# Altium schematic symbol library STPMotorControl_1.SchLib: 82 symbols
Pins are listed as number, name and electrical type; pins without a type are passive.

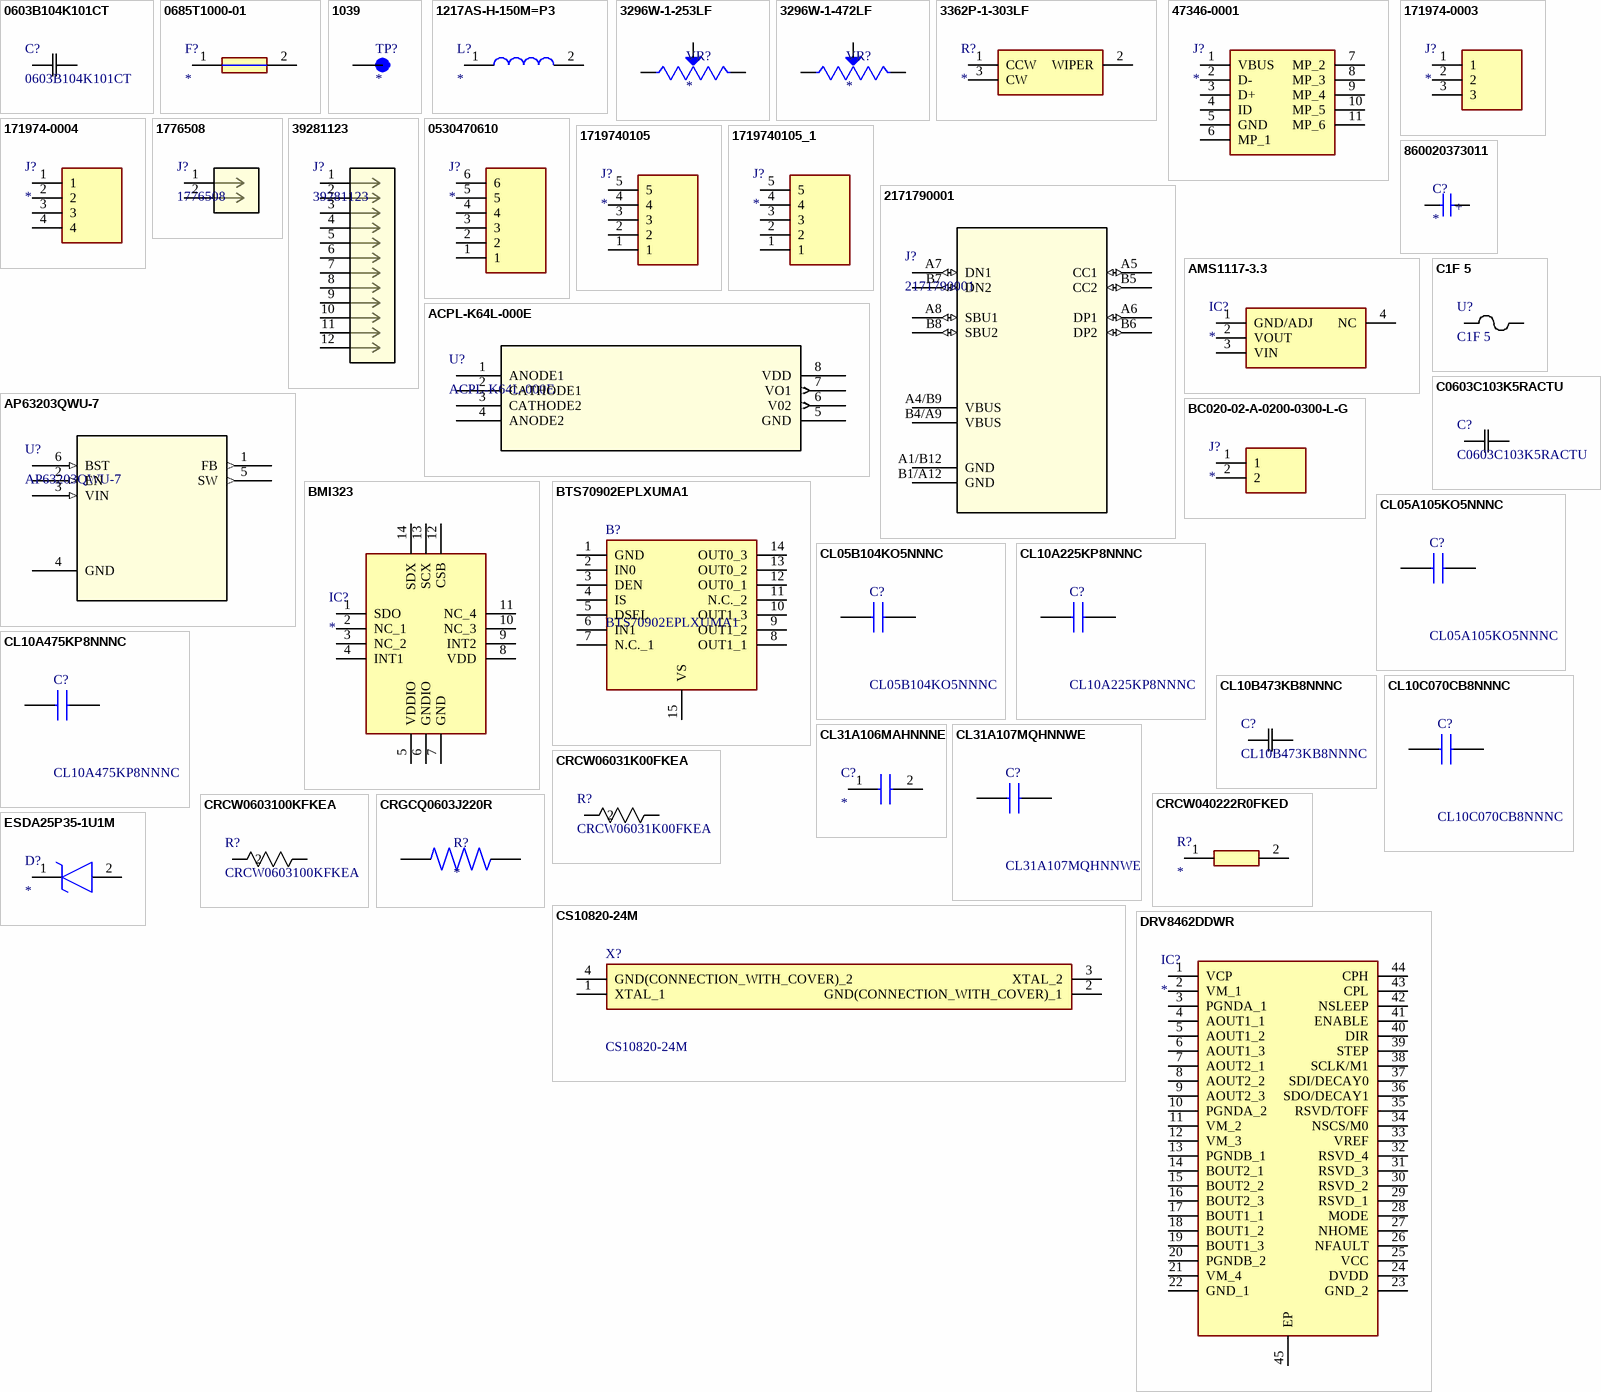
[diagram p0: symbols 0603B104K101CT to ESDA25P35-1U1M]

## 0603B104K101CT
designator C?
Description; Manufacturer_Name: Walsin; Copyright: Copyright (C) 2025 Ultra Librarian. All rights reserved.; Manufacturer_Part_Number: 0603B104K101CT
footprint CAP_0603_WAL
pins: 1, 2

## 0685T1000-01
designator F?
Fuse; Manufacturer_Name: BelFuse; Manufacturer_Part_Number: 0685T1000-01; Datasheet Link: https://www.belfuse.com/resources/datasheets/circuitprotection/ds-cp-c1t-series.pdf; Height: 0.83mm
footprint FUSC3216X83N
pins: 1, 2

## 1039
designator TP?
Slotted Type THM Test Point; MF: Keystone; MP: 1039; SnapEDA_Link: https://www.snapeda.com/parts/1039/Keystone/view-part/?ref=snap; Package: None; Value: *; Check_prices: https://www.snapeda.com/parts/1039/Keystone/view-part/?ref=eda
footprint KEYSTONE_1039
pins: TP

## 1217AS-H-150M=P3
designator L?
Inductor; Manufacturer_Name: Murata Electronics; Manufacturer_Part_Number: 1217AS-H-150M=P3; Datasheet Link: https://search.murata.co.jp/Ceramy/image/img/P02/J(E)TE243B-0035_DEM8045C.pdf; Height: 4.5mm; Mouser Part Number: 81-1217AS-H-150MP3; Mouser Price/Stock: https://www.mouser.co.uk/ProductDetail/Murata-Electronics/1217AS-H-150M%3dP3?qs=KuGPmAKtFKX7NbjmVB%2FVOw%3D%3D; Arrow Part Number: 1217AS-H-150M=P3; Arrow Price/Stock: https://www.arrow.com/en/products/1217as-h-150mp3/murata-manufacturing?region=nac
footprint 1217ASH100MP3
pins: 1, 2

## 3296W-1-253LF
designator VR?
TRIMMER,CERMET,REST 25 KILOHMS,PCB,25 TURNS,PWR-RTG 0.5W | Bourns 3296W-1-253LF; SnapEDA_Link: https://www.snapeda.com/parts/3296W-1-253LF/Bourns/view-part/?ref=snap; Package: NON STANDARD-3 Bourns; Value: *; MF: Bourns; MP: 3296W-1-253LF; Check_prices: https://www.snapeda.com/parts/3296W-1-253LF/Bourns/view-part/?ref=eda
footprint TRIM_3296W-1-253LF
pins: 1 CCW, 2 WIPER, 3 CW

## 3296W-1-472LF
designator VR?
3296W top adj cermet trimmer 4K7 10%,PCB,25 Turns,Pwr-Rtg 0.5W | Bourns 3296W-1-472LF; SnapEDA_Link: https://www.snapeda.com/parts/3296W-1-472LF/Bourns/view-part/?ref=snap; Package: NON STANDARD-3 Bourns; Value: *; MF: Bourns; MP: 3296W-1-472LF; Check_prices: https://www.snapeda.com/parts/3296W-1-472LF/Bourns/view-part/?ref=eda
footprint TRIM_3296W-1-472LF
pins: 1 CCW, 2 WIPER, 3 CW

## 3362P-1-303LF
designator R?
Resistor; Manufacturer_Name: Bourns; Manufacturer_Part_Number: 3362P-1-303LF; Datasheet Link: https://datasheet.datasheetarchive.com/originals/distributors/SFDatasheet-6/sf-000139931.pdf; Mouser Part Number: 652-3362P-1-303LF; Mouser Price/Stock: https://www.mouser.co.uk/ProductDetail/Bourns/3362P-1-303LF?qs=Z6TheJuxhEr3uHsohP3p0g%3D%3D; Arrow Part Number: 3362P-1-303LF; Arrow Price/Stock: https://www.arrow.com/en/products/3362p-1-303lf/bourns
footprint 3362P_1
pins: 1 CCW, 2 WIPER, 3 CW

## 47346-0001
designator J?
Connector; Manufacturer_Name: Molex; Manufacturer_Part_Number: 47346-0001; Datasheet Link: http://www.molex.com/pdm_docs/sd/473460001_sd.pdf; Height: 3.19mm; Mouser Part Number: 538-47346-0001; Mouser Price/Stock: https://www.mouser.co.uk/ProductDetail/Molex/47346-0001?qs=c2CV6XM0DweJBWaSeyWeCw%3D%3D
footprint 473460001
pins: 1 VBUS, 2 D-, 3 D+, 4 ID, 5 GND, 6 MP_1, 7 MP_2, 8 MP_3, 9 MP_4, 10 MP_5, 11 MP_6

## 171974-0003
designator J?
Connector; Manufacturer_Name: Molex; Manufacturer_Part_Number: 171974-0003; Datasheet Link: https://www.molex.com/pdm_docs/sd/1719740004_sd.pdf; Height: 7mm; Mouser Part Number: 538-171974-0003; Mouser Price/Stock: https://www.mouser.co.uk/ProductDetail/Molex/171974-0003?qs=lc2O%252BfHJPVYntbbOXokF%2FA%3D%3D
footprint SHDR3W97P0X254_1X3_1008X1359X700P
pins: 1, 2, 3

## 171974-0004
designator J?
Connector; Manufacturer_Name: Molex; Manufacturer_Part_Number: 171974-0004; Datasheet Link: https://www.molex.com/pdm_docs/sd/1719740004_sd.pdf; Height: 7mm; Mouser Part Number: 538-171974-0004; Mouser Price/Stock: https://www.mouser.co.uk/ProductDetail/Molex/171974-0004?qs=lc2O%252BfHJPVbT43D8v40enA%3D%3D; Arrow Part Number: 171974-0004; Arrow Price/Stock: https://www.arrow.com/en/products/1719740004/molex?region=nac
footprint SHDR4W97P0X254_1X4_1262X1359X700P
pins: 1, 2, 3, 4

## 1776508
designator J?
PCB headers, nominal current: 12 A, rated voltage (III/2): 320 V, number of positions: 2, pitch: 5.08 mm, color: green, contact surface: Tin, mounting: Wave soldering, Gold-plated contact surface / color: Green RAL 6021; Manufacturer_Name: Phoenix Contact; Copyright: Copyright (C) 2026 Ultra Librarian. All rights reserved.; Manufacturer_Part_Number: 1776508; RefDes: RefDes; Type: Type
footprint CONN_1776508
pins: 1, 2

## 39281123
designator J?
Mini-Fit Jr. Vertical Header, 4.20mm Pitch, Dual Row, 12 Circuits, without Snap-in Plastic Peg PCB Lock, Tin, Natural; Manufacturer_Name: Molex Connector Corporation; Copyright: Copyright (C) 2025 Ultra Librarian. All rights reserved.; Manufacturer_Part_Number: 39281123; RefDes: RefDes; Type: Type
footprint CONN_SD-5566-002_12_MOL
pins: 1, 2, 3, 4, 5, 6, 7, 8, 9, 10, 11, 12

## 0530470610
designator J?
Connector; Manufacturer_Name: Molex; Manufacturer_Part_Number: 0530470610; Datasheet Link: https://www.molex.com/en-us/products/part-detail-pdf/530470610?display=pdf; Height: 4.2mm; Mouser Part Number: N/A; Mouser Price/Stock: https://www.mouser.co.uk/ProductDetail/Molex/0530470610?qs=PBcRNPEHKsoVfWX4tW1QoQ%3D%3D; Arrow Part Number: 0530470610; Arrow Price/Stock: https://www.arrow.com/en/products/0530470610/molex.html?utm_currency=USD&region=europe
footprint 530470610
pins: 1, 2, 3, 4, 5, 6

## 1719740105
designator J?
Connector; Manufacturer_Name: Molex; Manufacturer_Part_Number: 1719740105; Datasheet Link: https://www.molex.com/en-us/products/part-detail-pdf/1719740105?display=pdf; Height: 7mm
footprint 171974YY05
pins: 1, 2, 3, 4, 5

## 1719740105_1
designator J?
Connector; Manufacturer_Name: Molex; Manufacturer_Part_Number: 1719740105; Datasheet Link: https://www.molex.com/en-us/products/part-detail-pdf/1719740105?display=pdf; Height: 7mm
footprint 171974YY05
pins: 1, 2, 3, 4, 5

## 2171790001
designator J?
Universal Serial Bus (USB) Shielded I/O Receptacle, Type C, Right-Angle, Top Mount, Surface Mount, Single Row, 16 Circuits, Gold (Au) Plating; Manufacturer_Name: Molex Connector Corporation; Copyright: Copyright (C) 2025 Ultra Librarian. All rights reserved.; Manufacturer_Part_Number: 2171790001; RefDes: RefDes; Type: Type
footprint 2171790001_MOL
pins: A1/B12 GND (power), A4/B9 VBUS (power), A5 CC1 (io), A6 DP1 (io), A7 DN1 (io), A8 SBU1 (io), B1/A12 GND (power), B4/A9 VBUS (power), B5 CC2 (io), B6 DP2 (io), B7 DN2 (io), B8 SBU2 (io)

## 860020373011
designator C?
330 ÂµF 16 V Aluminum Electrolytic Capacitors Radial, Can 2000 Hrs @ 105Â°C; MF: WÃ¼rth Elektronik; MP: 860020373011; SnapEDA_Link: https://www.snapeda.com/parts/860020373011/W%25C3%25BCrth+Elektronik+Midcom/view-part/?ref=snap; Package: Radial WÃ¼rth Elektronik; Value: *; Check_prices: https://www.snapeda.com/parts/860020373011/W%25C3%25BCrth+Elektronik+Midcom/view-part/?ref=eda
footprint 860020373011
pins: 1 POS, 2 NEG
text: +

## ACPL-K64L-000E
designator U?
Description; Manufacturer_Name: Avago Technologies; Copyright: Copyright (C) 2026 Ultra Librarian. All rights reserved.; Manufacturer_Part_Number: ACPL-K64L-000E; RefDes: RefDes; Type: Type
footprint STRETCHED_SO-8_AVA
pins: 1 ANODE1, 2 CATHODE1, 3 CATHODE2, 4 ANODE2, 5 GND (power), 6 V02 (out), 7 VO1 (out), 8 VDD (power)

## AMS1117-3.3
designator IC?
Integrated Circuit; Manufacturer_Name: Advanced; Manufacturer_Part_Number: AMS1117-3.3; Datasheet Link: https://datasheet.datasheetarchive.com/originals/distributors/Datasheets-28/DSA-550594.pdf; Height: 1.8mm
footprint SOT229P700X180-4N
pins: 1 GND/ADJ, 2 VOUT, 3 VIN, 4 NC

## AP63203QWU-7
designator U?
Description; Manufacturer_Name: Diodes Inc; Type: Power Management; Copyright: Copyright (C) 2026 Ultra Librarian. All rights reserved.; Manufacturer_Part_Number: AP63203QWU-7; RefDes: RefDes
footprint TSOT26_DIO
pins: 1 FB (out), 2 EN (in), 3 VIN (in), 4 GND (power), 5 SW (out), 6 BST (in)

## BC020-02-A-0200-0300-L-G
designator J?
Connector; Manufacturer_Name: GCT (GLOBAL CONNECTOR TECHNOLOGY); Manufacturer_Part_Number: BC020-02-A-0200-0300-L-G; Datasheet Link: https://gct.co/connector/bc020; Mouser Part Number: 640-BC02002A02300LG; Mouser Price/Stock: https://www.mouser.co.uk/ProductDetail/GCT/BC020-02-A-0200-0300-L-G?qs=KUoIvG%2F9IlakgsojlT9P9w%3D%3D
footprint BC02002A02000300LG
pins: 1, 2

## BMI323
designator IC?
Integrated Circuit; Manufacturer_Name: BOSCH; Manufacturer_Part_Number: BMI323; Datasheet Link: https://www.bosch-sensortec.com/media/boschsensortec/downloads/datasheets/bst-bmi323-ds000.pdf; Height: 0.87mm; Mouser Part Number: 262-BMI323; Mouser Price/Stock: https://www.mouser.co.uk/ProductDetail/Bosch-Sensortec/BMI323?qs=By6Nw2ByBD3%2FE1v0UqNQPQ%3D%3D; Arrow Part Number: BMI323; Arrow Price/Stock: https://www.arrow.com/en/products/bmi323/bosch-sensortec?utm_currency=USD&region=nac
footprint BMI323
pins: 1 SDO, 2 NC_1, 3 NC_2, 4 INT1, 5 VDDIO, 6 GNDIO, 7 GND, 8 VDD, 9 INT2, 10 NC_3, 11 NC_4, 12 CSB, 13 SCX, 14 SDX

## BTS70902EPLXUMA1
designator B?
Power Load Distribution Switch, High Side, Active High, AEC-Q100, 2 Outputs, 5.7 A, 0.09 ohm PG-TSDSO-14; Manufacturer_Name: Infineon; Geometry.Height: 1.15mm; Manufacturer_Part_Number: BTS70902EPLXUMA1; Mouser Part Number: 726-BTS70902EPLXUMA1; Mouser Price/Stock: https://www.mouser.co.uk/ProductDetail/Infineon-Technologies/BTS70902EPLXUMA1?qs=Jm2GQyTW%2Fbhq4sIv7OLI2g%3D%3D; Arrow Part Number: *; Arrow Price/Stock: *; Datasheet Link: https://www.infineon.com/dgdl/Infineon-BTS7090-2EPL-DataSheet-v01_00-EN.pdf?fileId=8ac78c8c850f4bee0185a14f60fd5abb
footprint SOP65P600X115-15N
pins: 1 GND, 2 IN0, 3 DEN, 4 IS, 5 DSEL, 6 IN1, 7 N.C._1, 8 OUT1_1, 9 OUT1_2, 10 OUT1_3, 11 N.C._2, 12 OUT0_1, 13 OUT0_2, 14 OUT0_3, 15 VS

## C1F 5
designator U?
Description; Manufacturer_Name: Belfuse; Copyright: Copyright (C) 2025 Ultra Librarian. All rights reserved.; Manufacturer_Part_Number: C1F 5
footprint C1_BEL
pins: 1, 2

## C0603C103K5RACTU
designator C?
SMD Comm X7R, Ceramic, 0.01 uF, 10%, 50 VDC, X7R, SMD, MLCC, Temperature Stable, Class II, 0603; Manufacturer_Name: Kemet; Copyright: Copyright (C) 2026 Ultra Librarian. All rights reserved.; Manufacturer_Part_Number: C0603C103K5RACTU
footprint CAPC17595_87N_KEM
pins: 1, 2

## CL05A105KO5NNNC
designator C?
Samsung Electro-Mechanics 0402 (1005M) 1uF Multilayer Ceramic Capacitor MLCC 16V dc +/-10% SMD CL05A105KO5NNNC; Geometry.Height: 0.55mm; Manufacturer_Name: SAMSUNG; Manufacturer_Part_Number: CL05A105KO5NNNC; Mouser Part Number: 187-CL05A105KO5NNNC; Mouser Price/Stock: https://www.mouser.co.uk/ProductDetail/Samsung-Electro-Mechanics/CL05A105KO5NNNC?qs=349EhDEZ59pCm%252BzVtNxq%2FQ%3D%3D; Arrow Part Number: CL05A105KO5NNNC; Arrow Price/Stock: https://www.arrow.com/en/products/cl05a105ko5nnnc/samsung-electro-mechanics?utm_currency=USD&region=nac; Datasheet Link: https://datasheet.lcsc.com/szlcsc/Samsung-Electro-Mechanics-CL05A105KO5NNNC_C29266.pdf
footprint CAPC1005X55N
pins: 1, 2

## CL05B104KO5NNNC
designator C?
Samsung Electro-Mechanics CL05B104KO5NNNC 100nF Multilayer Ceramic Capacitor MLCC 16V dc +/-10% Tolerance SMD; Geometry.Height: 0.55mm; Manufacturer_Name: SAMSUNG; Manufacturer_Part_Number: CL05B104KO5NNNC; Mouser Part Number: 187-CL05B104KO5NNNC; Mouser Price/Stock: https://www.mouser.co.uk/ProductDetail/Samsung-Electro-Mechanics/CL05B104KO5NNNC?qs=hqM3L16%252BxlfT2SKOuAUq6Q%3D%3D; Arrow Part Number: CL05B104KO5NNNC; Arrow Price/Stock: https://www.arrow.com/en/products/cl05b104ko5nnnc/samsung-electro-mechanics.html?utm_currency=USD&region=europe; Datasheet Link: https://datasheet.datasheetarchive.com/originals/distributors/Datasheets-DGA10/2408147.pdf
footprint CAPC1005X55N
pins: 1, 2

## CL10A225KP8NNNC
designator C?
Samsung Electro-Mechanics 0603 CL 2.2uF Ceramic Multilayer Capacitor, 10 V, +85C, X5R Dielectric, +/-10% SMD; Geometry.Height: 0.9mm; Manufacturer_Name: SAMSUNG; Manufacturer_Part_Number: CL10A225KP8NNNC; Mouser Part Number: 187-CL10A225KP8NNNC; Mouser Price/Stock: https://www.mouser.co.uk/ProductDetail/Samsung-Electro-Mechanics/CL10A225KP8NNNC?qs=hqM3L16%252Bxldb5UYUGQVB5Q%3D%3D; Arrow Part Number: CL10A225KP8NNNC; Arrow Price/Stock: https://www.arrow.com/en/products/cl10a225kp8nnnc/samsung-electro-mechanics?region=europe; Datasheet Link: https://datasheet.datasheetarchive.com/originals/distributors/Datasheets-DGA10/2411103.pdf
footprint CAPC1608X90N
pins: 1, 2

## CL10A475KP8NNNC
designator C?
Multilayer Ceramic Capacitors MLCC - SMD/SMT; Manufacturer_Name: SAMSUNG; Geometry.Height: 0.9mm; Manufacturer_Part_Number: CL10A475KP8NNNC; Mouser Part Number: 187-CL10A475KP8NNNC; Mouser Price/Stock: https://www.mouser.co.uk/ProductDetail/Samsung-Electro-Mechanics/CL10A475KP8NNNC?qs=hqM3L16%252BxlfQRmkWsZz5vA%3D%3D; Arrow Part Number: CL10A475KP8NNNC; Arrow Price/Stock: https://www.arrow.com/en/products/cl10a475kp8nnnc/samsung-electro-mechanics?utm_currency=USD&region=nac; Datasheet Link: https://www.arrow.com/en/products/cl10a475kp8nnnc/samsung-electro-mechanics
footprint CAPC1608X90N
pins: 1, 2

## CL10B473KB8NNNC
designator C?
Description; Manufacturer_Name: Samsung; Copyright: Copyright (C) 2026 Ultra Librarian. All rights reserved.; Manufacturer_Part_Number: CL10B473KB8NNNC
footprint CAP_CL10_SAM
pins: 1, 2

## CL10C070CB8NNNC
designator C?
CAP CER 7PF 50V C0G/NP0 0603; Manufacturer_Name: SAMSUNG; Geometry.Height: 0.9mm; Manufacturer_Part_Number: CL10C070CB8NNNC; Mouser Part Number: 187-CL10C070CB8NNNC; Mouser Price/Stock: https://www.mouser.co.uk/ProductDetail/Samsung-Electro-Mechanics/CL10C070CB8NNNC?qs=XHchNesRtUZnqlJter2P1w%3D%3D; Arrow Part Number: CL10C070CB8NNNC; Arrow Price/Stock: https://www.arrow.com/en/products/cl10c070cb8nnnc/samsung-electro-mechanics?utm_currency=USD&region=europe; Datasheet Link: https://4donline.ihs.com/images/VipMasterIC/IC/SEMS/SEMS-S-A0001326985/SEMS-S-A0001326828-1.pdf?hkey=52A5661711E402568146F3353EA87419
footprint CAPC1608X90N
pins: 1, 2

## CL31A106MAHNNNE
designator C?
Capacitor; Manufacturer_Name: SAMSUNG; Manufacturer_Part_Number: CL31A106MAHNNNE; Datasheet Link: https://www.arrow.com/en/products/cl31a106mahnnne/samsung-electro-mechanics; Height: 1.8mm; Mouser Part Number: 187-CL31A106MAHNNNE; Mouser Price/Stock: https://www.mouser.co.uk/ProductDetail/Samsung-Electro-Mechanics/CL31A106MAHNNNE?qs=9y2YoPkPyvYkOWbcUKSn%252BQ%3D%3D; Arrow Part Number: CL31A106MAHNNNE; Arrow Price/Stock: https://www.arrow.com/en/products/cl31a106mahnnne/samsung-electro-mechanics?region=nac
footprint CAPC3216X180N
pins: 1, 2

## CL31A107MQHNNWE
designator C?
Manufacturer_Name: SAMSUNG; Geometry.Height: 1.8mm; Manufacturer_Part_Number: CL31A107MQHNNWE; Mouser Part Number: 187-CL31A107MQHNNWE; Mouser Price/Stock: https://www.mouser.co.uk/ProductDetail/Samsung-Electro-Mechanics/CL31A107MQHNNWE?qs=xZ%2FP%252Ba9zWqZ1plV7MDkjgw%3D%3D; Arrow Part Number: CL31A107MQHNNWE; Arrow Price/Stock: https://www.arrow.com/en/products/cl31a107mqhnnwe/samsung-electro-mechanics?utm_currency=USD&region=nac; Datasheet Link: https://www.arrow.com/en/products/cl31a107mqhnnwe/samsung-electro-mechanics
footprint CAPC3216X180N
pins: 1, 2

## CRCW06031K00FKEA
designator R?
D11/CRCW0603 100 1K 1% ET1 e3; Manufacturer_Name: Vishay; Copyright: Copyright (C) 2026 Ultra Librarian. All rights reserved.; Manufacturer_Part_Number: CRCW06031K00FKEA
footprint RES_CRCW_0603
pins: 1, 2

## CRCW040222R0FKED
designator R?
Resistor; Manufacturer_Name: Vishay; Manufacturer_Part_Number: CRCW040222R0FKED; Datasheet Link: http://www.vishay.com/docs/20035/dcrcwe3.pdf; Height: 0.4mm; Mouser Part Number: 71-CRCW0402-22-E3; Mouser Price/Stock: https://www.mouser.co.uk/ProductDetail/Vishay-Dale/CRCW040222R0FKED?qs=oYI6rOI5zktmsFG%2Fpzi5yg%3D%3D; Arrow Part Number: CRCW040222R0FKED; Arrow Price/Stock: https://www.arrow.com/en/products/crcw040222r0fked/vishay?utm_currency=USD&region=europe
footprint CRCW0402200KFKED
pins: 1, 2

## CRCW0603100KFKEA
designator R?
D11/CRCW0603 100 100K 1% ET1 e3; Manufacturer_Name: Vishay; Copyright: Copyright (C) 2026 Ultra Librarian. All rights reserved.; Manufacturer_Part_Number: CRCW0603100KFKEA
footprint RES_CRCW_0603_VIS
pins: 1, 2

## CRGCQ0603J220R
designator R?
Fixed Resistor CRGCQ 0603 220R 5%; MF: TE Connectivity; MP: CRGCQ0603J220R; SnapEDA_Link: https://www.snapeda.com/parts/CRGCQ0603J220R/TE+Connectivity/view-part/?ref=snap; Package: 0603-2 TE Connectivity; Value: *; Check_prices: https://www.snapeda.com/parts/CRGCQ0603J220R/TE+Connectivity/view-part/?ref=eda
footprint RESC1608X55N
pins: 1, 2

## CS10820-24M
designator X?
24 MHz +/-15ppm Crystal 6pF 80 Ohms 4-SMD, No Lead , -40C ~ 125C; Manufacturer_Name: NDK; Geometry.Height: 0.5mm; Manufacturer_Part_Number: CS10820-24M; Mouser Part Number: *; Mouser Price/Stock: *; Arrow Part Number: *; Arrow Price/Stock: *; Datasheet Link: https://mm.digikey.com/Volume0/opasdata/d220001/medias/docus/7847/EXS00A-CS10820.pdf
footprint CS1082024M
pins: 1 XTAL_1, 2 GND(CONNECTION_WITH_COVER)_1, 3 XTAL_2, 4 GND(CONNECTION_WITH_COVER)_2

## DRV8462DDWR
designator IC?
Integrated Circuit; Manufacturer_Name: Texas Instruments; Manufacturer_Part_Number: DRV8462DDWR; Datasheet Link: https://www.ti.com/lit/gpn/drv8462; Height: 1.2mm; Mouser Part Number: 595-DRV8462DDWR; Mouser Price/Stock: https://www.mouser.co.uk/ProductDetail/Texas-Instruments/DRV8462DDWR?qs=rQFj71Wb1eVexvYNsDfnvA%3D%3D; Arrow Part Number: DRV8462DDWR; Arrow Price/Stock: https://www.arrow.com/en/products/drv8462ddwr/texas-instruments?utm_currency=USD&region=nac
footprint SOP64P810X120-45N
pins: 1 VCP, 2 VM_1, 3 PGNDA_1, 4 AOUT1_1, 5 AOUT1_2, 6 AOUT1_3, 7 AOUT2_1, 8 AOUT2_2, 9 AOUT2_3, 10 PGNDA_2, 11 VM_2, 12 VM_3, 13 PGNDB_1, 14 BOUT2_1, 15 BOUT2_2, 16 BOUT2_3, 17 BOUT1_1, 18 BOUT1_2, 19 BOUT1_3, 20 PGNDB_2, 21 VM_4, 22 GND_1, 23 GND_2, 24 DVDD, 25 VCC, 26 NFAULT, 27 NHOME, 28 MODE, 29 RSVD_1, 30 RSVD_2, 31 RSVD_3, 32 RSVD_4, 33 VREF, 34 NSCS/M0, 35 RSVD/TOFF, 36 SDO/DECAY1, 37 SDI/DECAY0, 38 SCLK/M1, 39 STEP, 40 DIR, 41 ENABLE, 42 NSLEEP, 43 CPL, 44 CPH, 45 EP

## ESDA25P35-1U1M
designator D?
TVS Diode (Uni-directional); Manufacturer_Name: STMicroelectronics; Manufacturer_Part_Number: ESDA25P35-1U1M; Datasheet Link: https://www.st.com/resource/en/datasheet/esda20p50-1u1m.pdf; Height: 0.6mm; Mouser Part Number: 511-ESDA25P35-1U1M; Mouser Price/Stock: https://www.mouser.co.uk/ProductDetail/STMicroelectronics/ESDA25P35-1U1M?qs=aVyJF2WnouQUWqgNP85ZrA%3D%3D; Arrow Part Number: ESDA25P35-1U1M; Arrow Price/Stock: https://www.arrow.com/en/products/esda25p35-1u1m/stmicroelectronics.html?utm_currency=USD&region=nac
footprint ESDA25P351U1M
pins: 1 K, 2 A

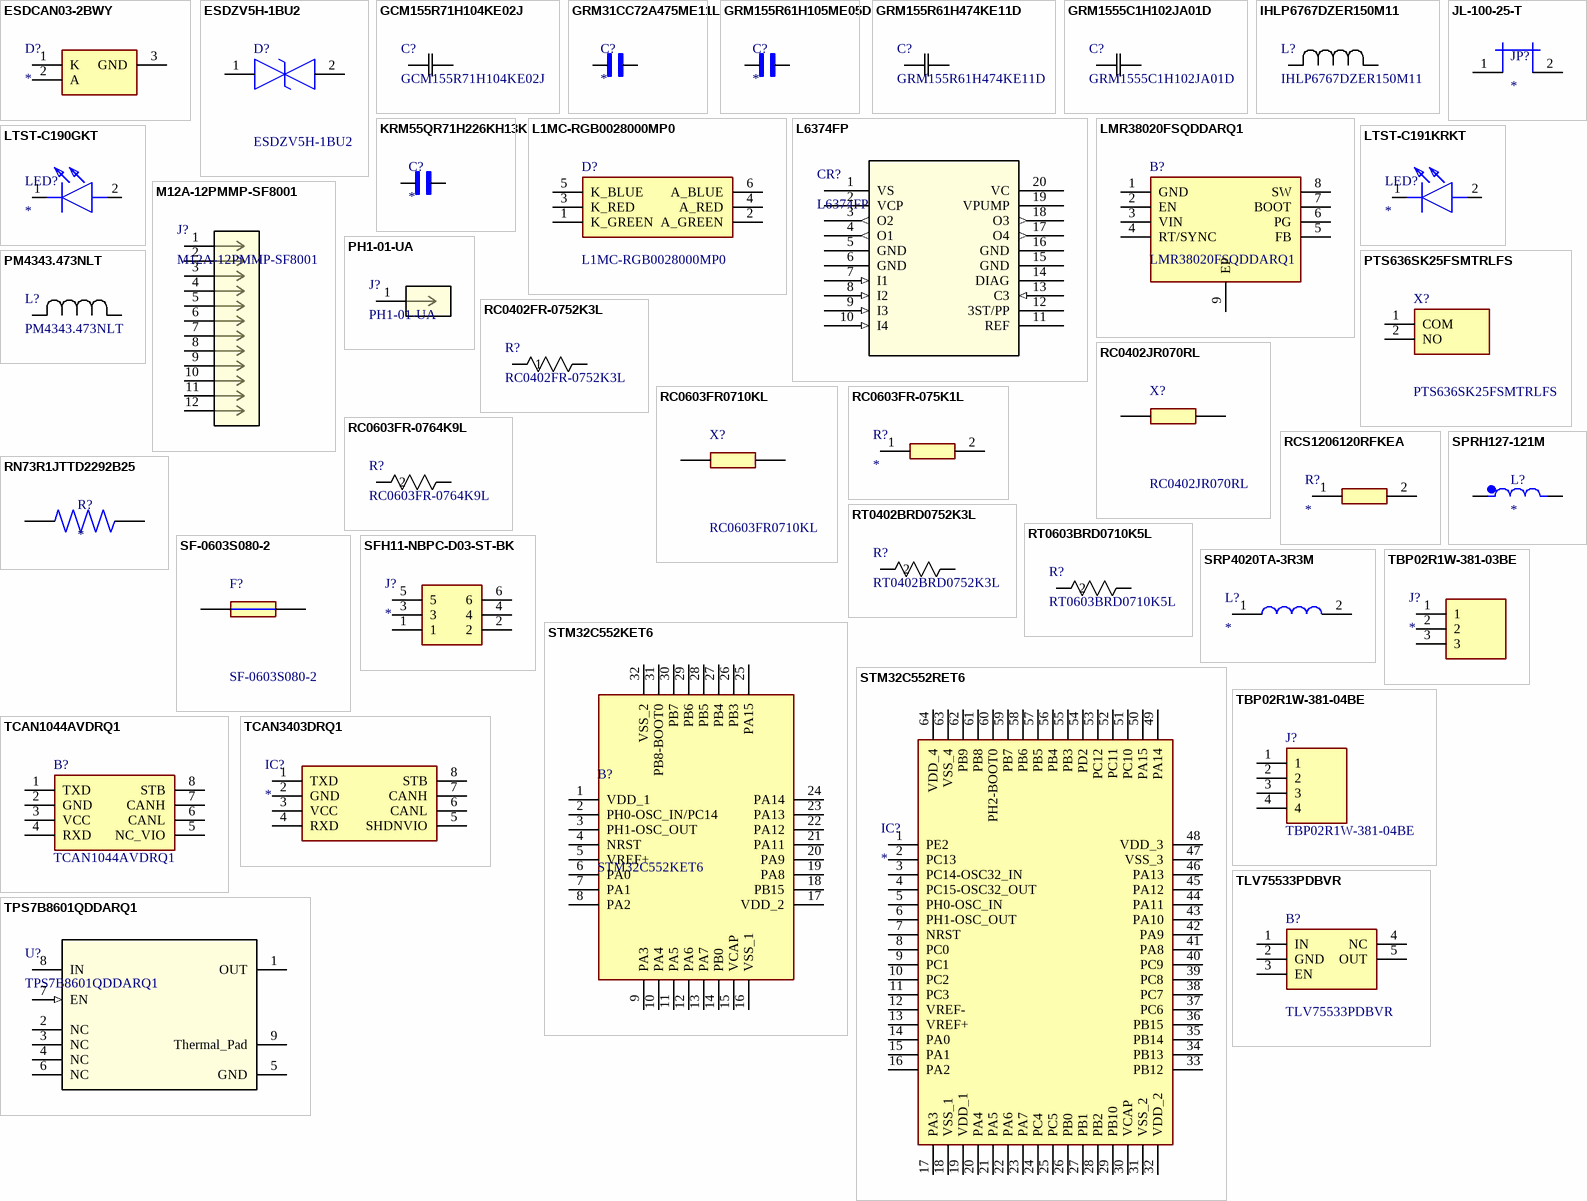
[diagram p1: symbols ESDCAN03-2BWY to TPS7B8601QDDARQ1]

## ESDCAN03-2BWY
designator D?
TVS Diode (Uni-directional); Manufacturer_Name: STMicroelectronics; Manufacturer_Part_Number: ESDCAN03-2BWY; Datasheet Link: https://www.st.com/resource/en/datasheet/esdcan03-2bwy.pdf; Height: 1.1mm; Mouser Part Number: 511-ESDCAN03-2BWY; Mouser Price/Stock: https://www.mouser.co.uk/ProductDetail/STMicroelectronics/ESDCAN03-2BWY?qs=FqY30PPN9V2iiokjuqa22Q%3D%3D; Arrow Part Number: ESDCAN03-2BWY; Arrow Price/Stock: https://www.arrow.com/en/products/esdcan03-2bwy/stmicroelectronics.html?utm_currency=USD&region=europe
footprint SOT65P210X110-3N
pins: 1 K, 2 A, 3 GND (power)

## ESDZV5H-1BU2
designator D?
Ultra low clamping single line bidirectional ESD protection; Manufacturer_Name: STMicroelectronics; Geometry.Height: 0.27mm; Manufacturer_Part_Number: ESDZV5H-1BU2; Mouser Part Number: 511-ESDZV5H-1BU2; Mouser Price/Stock: https://www.mouser.co.uk/ProductDetail/STMicroelectronics/ESDZV5H-1BU2?qs=YCa%2FAAYMW00tiYJQ%2FjLfEQ%3D%3D; Arrow Part Number: ESDZV5H-1BU2; Arrow Price/Stock: https://www.arrow.com/en/products/esdzv5h-1bu2/stmicroelectronics?utm_currency=USD&region=europe; Datasheet Link: https://www.st.com/resource/en/datasheet/esdzv5h-1bu2.pdf
footprint ESDZV5H1BU2
pins: 1, 2

## GCM155R71H104KE02J
designator C?
Description; Manufacturer_Name: Murata; Copyright: Copyright (C) 2026 Ultra Librarian. All rights reserved.; Manufacturer_Part_Number: GCM155R71H104KE02J
footprint CAP_GCM1555_0402_MUR
pins: 1, 2

## GRM31CC72A475ME11L
designator C?
SMD capacitor X7S(EIA) with capacitance 4.7uF Tol.20%. Rated voltage 100Vdc 125C; MF: Murata Electronics; MP: GRM31CC72A475ME11L; SnapEDA_Link: https://www.snapeda.com/parts/GRM31CC72A475ME11L/Murata/view-part/?ref=snap; Package: 3216-2 Murata; Value: *; Check_prices: https://www.snapeda.com/parts/GRM31CC72A475ME11L/Murata/view-part/?ref=eda
footprint CAPC3216X190N
pins: 1, 2

## GRM155R61H105ME05D
designator C?
SMD capacitor X5R(EIA) with capacitance 1.0uF Tol.20%. Rated voltage 50Vdc 85C; MF: Murata Electronics; MP: GRM155R61H105ME05D; SnapEDA_Link: https://www.snapeda.com/parts/GRM155R61H105ME05D/Murata/view-part/?ref=snap; Package: 2012 Murata; Value: *; Check_prices: https://www.snapeda.com/parts/GRM155R61H105ME05D/Murata/view-part/?ref=eda
footprint CAPC1005X60N
pins: 1, 2

## GRM155R61H474KE11D
designator C?
Description; Manufacturer_Name: Murata; Copyright: Copyright (C) 2025 Ultra Librarian. All rights reserved.; Manufacturer_Part_Number: GRM155R61H474KE11D
footprint CAP_GRM155_MUR
pins: 1, 2

## GRM1555C1H102JA01D
designator C?
Description; Manufacturer_Name: Murata; Copyright: Copyright (C) 2026 Ultra Librarian. All rights reserved.; Manufacturer_Part_Number: GRM1555C1H102JA01D
footprint CAP_GRM_155_MUR
pins: 1, 2

## IHLP6767DZER150M11
designator L?
IHLP-6767DZ-11 15 20% ER E3; Manufacturer_Name: Vishay; Copyright: Copyright (C) 2026 Ultra Librarian. All rights reserved.; Manufacturer_Part_Number: IHLP6767DZER150M11; Datasheet: https://www.vishay.com/doc?34306
footprint IND_IHLP-6767DZ_VIS
pins: 1, 2

## JL-100-25-T
designator JP?
2 (1 x 2) Position Shunt Connector White Insulated 0.100" (2.54mm) Silver; MP: JL-100-25-T; Value: *; Price: None; Package: None; Availability: Unavailable
footprint SAMTEC_JL-100-25-T
pins: 1, 2

## KRM55QR71H226KH13K
designator C?
22 ÂµF Â±10% 50V Ceramic Capacitor X7R SMD, J-Lead; MF: Murata Electronics; MP: KRM55QR71H226KH13K; SnapEDA_Link: https://www.snapeda.com/parts/KRM55QR71H226KH13K/Murata/view-part/?ref=snap; Package: None; Value: *; Check_prices: https://www.snapeda.com/parts/KRM55QR71H226KH13K/Murata/view-part/?ref=eda
footprint CAPC6153X390N
pins: 1, 2

## L1MC-RGB0028000MP0
designator D?
LED Lighting Color LUXEON 3528 RGB Red, Green, Blue (RGB) 622nm Red, 525nm Green, 470nm Blue 6-PLCC; Manufacturer_Name: Lumileds; Geometry.Height: 1.85mm; Manufacturer_Part_Number: L1MC-RGB0028000MP0; Mouser Part Number: 997-L1MCRGB00280MP; Mouser Price/Stock: https://www.mouser.co.uk/ProductDetail/Lumileds/L1MC-RGB0028000MP0?qs=Znm5pLBrcAJSGF05jr80lQ%3D%3D; Arrow Part Number: L1MC-RGB0028000MP0; Arrow Price/Stock: https://www.arrow.com/en/products/l1mc-rgb0028000mp0/lumileds?utm_currency=USD&region=asia; Datasheet Link: https://lumileds.com/wp-content/uploads/2022/03/DS388-luxeon-3528-rgb-datasheet.pdf
footprint L1MCRGB0028000MP0
footprint L1MCRGB0028000MP0
pins: 1 K_GREEN, 2 A_GREEN, 3 K_RED, 4 A_RED, 5 K_BLUE, 6 A_BLUE

## L6374FP
designator CR?
INDUSTRIAL QUAD LINE DRIVER; Manufacturer_Name: STMicroelectronics; Copyright: Copyright (C) 2025 Ultra Librarian. All rights reserved.; Manufacturer_Part_Number: L6374FP; RefDes: RefDes; Type: Type
footprint SO-20_STM
pins: 1 VS (power), 2 VCP (power), 3 O2 (out), 4 O1 (out), 5 GND (power), 6 GND (power), 7 I1 (in), 8 I2 (in), 9 I3 (in), 10 I4 (in), 11 REF (power), 12 3ST/PP, 13 C3 (in), 14 DIAG, 15 GND (power), 16 GND (power), 17 O4 (out), 18 O3 (out), 19 VPUMP (power), 20 VC (power)

## LMR38020FSQDDARQ1
designator B?
Switching Voltage Regulators Automotive SIMPLE SWITCHER power converter 4.2-V to 80-V, 2-A, synchronous buck converter; Manufacturer_Name: Texas Instruments; Geometry.Height: 1.7mm; Manufacturer_Part_Number: LMR38020FSQDDARQ1; Mouser Part Number: 595-MR38020FSQDDARQ1; Mouser Price/Stock: https://www.mouser.co.uk/ProductDetail/Texas-Instruments/LMR38020FSQDDARQ1?qs=ulEaXIWI0c9yq0Uk8ysL6g%3D%3D; Arrow Part Number: LMR38020FSQDDARQ1; Arrow Price/Stock: https://www.arrow.com/en/products/lmr38020fsqddarq1/texas-instruments.html?utm_currency=USD&region=nac; Datasheet Link: https://www.ti.com/lit/gpn/LMR38010
footprint SOIC127P600X170-9N
footprint SOIC127P600X170-9N
pins: 1 GND, 2 EN, 3 VIN, 4 RT/SYNC, 5 FB, 6 PG, 7 BOOT, 8 SW, 9 EP

## LTST-C190GKT
designator LED?
LED; Manufacturer_Name: Lite-On; Manufacturer_Part_Number: LTST-C190GKT; Datasheet Link: https://media.digikey.com/pdf/Data%20Sheets/Lite-On%20PDFs/LTST-C190GKT.pdf; Height: 0.9mm; Mouser Part Number: 859-LTST-C190GKT; Mouser Price/Stock: https://www.mouser.co.uk/ProductDetail/LITEON/LTST-C190GKT?qs=drxkyCeiWgbQzclgbojDOg%3D%3D; Arrow Part Number: LTST-C190GKT; Arrow Price/Stock: https://www.arrow.com/en/products/ltst-c190gkt/lite-on-technology.html?utm_currency=USD&region=nac
footprint LEDC1608X90N
pins: 1 K, 2 A

## LTST-C191KRKT
designator LED?
LED; Manufacturer_Name: Lite-On; Manufacturer_Part_Number: LTST-C191KRKT; Datasheet Link: http://www.mouser.com/ds/2/239/S_110_LTST-C191KRKT-539838.pdf; Height: 0.55mm; Mouser Part Number: 859-LTST-C191KRKT; Mouser Price/Stock: https://www.mouser.co.uk/ProductDetail/LITEON/LTST-C191KRKT?qs=BAIUz4Y8PJBLfOhzue0q%252BA%3D%3D; Arrow Part Number: LTST-C191KRKT; Arrow Price/Stock: https://www.arrow.com/en/products/ltst-c191krkt/lite-on-technology?utm_currency=USD&region=nac
footprint LEDC1608X55N
pins: 1 K, 2 A

## M12A-12PMMP-SF8001
designator J?
Description; Manufacturer_Name: Amphenol ICC; Type: Circular Connector Assemblies; Copyright: Copyright (C) 2025 Ultra Librarian. All rights reserved.; Manufacturer_Part_Number: M12A-12PMMP-SF8001; RefDes: RefDes
footprint CONN_M12A-12PMMP-SF8001_AMP
pins: 1, 2, 3, 4, 5, 6, 7, 8, 9, 10, 11, 12

## PH1-01-UA
designator J?
Description; Manufacturer_Name: ADAM TECHNOLOGIES INC; Copyright: Copyright (C) 2025 Ultra Librarian. All rights reserved.; Manufacturer_Part_Number: PH1-01-UA; RefDes: RefDes; Type: Type
footprint CONN_PH1-01-UA_ADM
pins: 1

## PM4343.473NLT
designator L?
Description; Manufacturer_Name: Pulse Electronics Corporation; Copyright: Copyright (C) 2025 Ultra Librarian. All rights reserved.; Manufacturer_Part_Number: PM4343.473NLT
footprint IND_PA4343PM4343_FP2_PUL
pins: 1, 2

## PTS636SK25FSMTRLFS
designator X?
PTS636 Series SPST-NO Off-Mom 250 gf Top Actuated SMT Tactile Switch; Manufacturer_Name: LITTELFUSE; Geometry.Height: 2.7mm; Manufacturer_Part_Number: PTS636SK25FSMTRLFS; Mouser Part Number: *; Mouser Price/Stock: *; Arrow Part Number: *; Arrow Price/Stock: *; Datasheet Link: https://www.littelfuse.com/assetdocs/littelfuse-ck-tactile-pts636-series-datasheet?assetguid=8a16fd39-1f87-4545-ab06-9e057a0fe304
footprint PTS636SK25FSMTRLFS
pins: 1 COM, 2 NO

## RC0402FR-0752K3L
designator R?
SMD RES 52.3K-1/16W-1%;0402; Manufacturer_Name: Yageo; Copyright: Copyright (C) 2026 Ultra Librarian. All rights reserved.; Manufacturer_Part_Number: RC0402FR-0752K3L
footprint RES_RC0402_YAG
pins: 1, 2

## RC0402JR070RL
designator X?
Res Thick Film 0402 0 Ohm Epoxy Pad SMD T/R; Manufacturer_Name: Yageo Group; Geometry.Height: 0.4mm; Manufacturer_Part_Number: RC0402JR070RL; Mouser Part Number: *; Mouser Price/Stock: *; Arrow Part Number: RC0402JR070RL; Arrow Price/Stock: https://www.arrow.com/en/products/rc0402jr-070rl/yageo; Datasheet Link: https://www.yageo.com/upload/media/product/productsearch/datasheet/rchip/PYu-RC_Group_51_RoHS_L_11.pdf
footprint RESC1005X40N
pins: 1, 2

## RC0603FR0710KL
designator X?
YAGEO (PHYCOMP) RC0603 F; Manufacturer_Name: Yageo Group; Geometry.Height: 0.55mm; Manufacturer_Part_Number: RC0603FR0710KL; Mouser Part Number: *; Mouser Price/Stock: *; Arrow Part Number: RC0603FR0710KL; Arrow Price/Stock: https://www.arrow.com/en/products/rc0603fr-0710kl/yageo; Datasheet Link: http://www.yageo.com/documents/recent/PYu-RC0603_51_RoHS_L_v5.pdf
footprint RESC1608X55N
pins: 1, 2

## RC0603FR-075K1L
designator R?
Resistor; Manufacturer_Name: Yageo Group; Manufacturer_Part_Number: RC0603FR-075K1L; Datasheet Link: http://www.yageo.com/documents/recent/PYu-RC0603_51_RoHS_L_v5.pdf; Height: 0.55mm; Mouser Part Number: 603-RC0603FR-075K1L; Mouser Price/Stock: https://www.mouser.co.uk/ProductDetail/YAGEO/RC0603FR-075K1L?qs=gt6vzsuosg2jUUwxnI2PJQ%3D%3D; Arrow Part Number: RC0603FR-075K1L; Arrow Price/Stock: https://www.arrow.com/en/products/rc0603fr-075k1l/yageo?region=nac
footprint 473460001
pins: 1, 2

## RC0603FR-0764K9L
designator R?
Description; Manufacturer_Name: Yageo; Copyright: Copyright (C) 2026 Ultra Librarian. All rights reserved.; Manufacturer_Part_Number: RC0603FR-0764K9L
footprint RC0603N_YAG
pins: 1, 2

## RCS1206120RFKEA
designator R?
Resistor; Manufacturer_Name: Vishay; Manufacturer_Part_Number: RCS1206120RFKEA; Datasheet Link: https://www.vishay.com/docs/20065/rcse3.pdf; Mouser Part Number: 71-RCS1206120RFKEA; Mouser Price/Stock: https://www.mouser.co.uk/ProductDetail/Vishay-Dale/RCS1206120RFKEA?qs=6AVTNucw1PVQ8x%2F57bCkww%3D%3D
footprint RCS1206_E3
pins: 1, 2

## RN73R1JTTD2292B25
designator R?
MP: RN73R1JTTD2292B25; Package: None; Price: None; Value: *; Availability: Unavailable
footprint RESC1608X55N
pins: 1, 2

## RT0402BRD0752K3L
designator R?
No Description Available; Manufacturer_Name: Yageo; Copyright: Copyright (C) 2026 Ultra Librarian. All rights reserved.; Manufacturer_Part_Number: RT0402BRD0752K3L
footprint RC0402N_YAG
pins: 1, 2

## RT0603BRD0710K5L
designator R?
No Description Available; Manufacturer_Name: Yageo; Copyright: Copyright (C) 2026 Ultra Librarian. All rights reserved.; Manufacturer_Part_Number: RT0603BRD0710K5L
footprint RC0603N_YAG
pins: 1, 2

## SF-0603S080-2
designator F?
BOURNS - SF-0603S080-2 - FUSE, 0.8A, 32V, 0603; Geometry.Height: 0.55mm; Manufacturer_Name: Bourns; Manufacturer_Part_Number: SF-0603S080-2; Mouser Part Number: 652-SF-0603S080-2; Mouser Price/Stock: https://www.mouser.co.uk/ProductDetail/Bourns/SF-0603S080-2?qs=GIQXYiEeHGA9FWQ%2FXm8vuA%3D%3D; Arrow Part Number: SF-0603S080-2; Arrow Price/Stock: https://www.arrow.com/en/products/sf-0603s080-2/bourns?utm_currency=USD&region=nac; Datasheet Link: https://componentsearchengine.com/Datasheets/2/SF-0603S080-2.pdf
footprint FUSC1608X55N
pins: 1, 2

## SFH11-NBPC-D03-ST-BK
designator J?
Connector; Manufacturer_Name: Sullins; Manufacturer_Part_Number: SFH11-NBPC-D03-ST-BK; Datasheet Link: https://drawings-pdf.s3.amazonaws.com/11160.pdf; Height: 8.7mm
footprint SFH11NBPCD03STBK
pins: 1, 2, 3, 4, 5, 6

## SPRH127-121M
designator L?
MF: {'manufacturer': u'CODACA'}; MP: SPRH127-121M; Package: None; Price: None; Value: *; Availability: Unavailable
footprint IND_SPRH127-121M
pins: 1, 2

## SRP4020TA-3R3M
designator L?
Inductor; Manufacturer_Name: Bourns; Manufacturer_Part_Number: SRP4020TA-3R3M; Datasheet Link: https://www.bourns.com/docs/Product-Datasheets/SRP4020TA.pdf; Height: 2mm; Mouser Part Number: 652-SRP4020TA-3R3M; Mouser Price/Stock: https://www.mouser.co.uk/ProductDetail/Bourns/SRP4020TA-3R3M?qs=Ph8%2FHnX6CQx4K7XcRwo6CA%3D%3D; Arrow Part Number: SRP4020TA-3R3M; Arrow Price/Stock: https://www.arrow.com/en/products/srp4020ta-3r3m/bourns?region=nac
footprint SRP4020TA3R3M
pins: 1, 2

## STM32C552KET6
designator B?
Arm? Cortex?-M33 32-bit MCU with FPU, 144 MHz, 593 CoreMark?, up to 512Kbyte dualbank flash memory, 128-Kbyte RAM; Manufacturer_Name: STMicroelectronics; Geometry.Height: 1.6mm; Manufacturer_Part_Number: STM32C552KET6; Mouser Part Number: *; Mouser Price/Stock: *; Arrow Part Number: *; Arrow Price/Stock: *; Datasheet Link: https://www.st.com/resource/en/datasheet/stm32c551cc.pdf; Supplier 1: DigiKey; Supplier Part Number 1: 497-STM32C552KET6-ND
footprint QFP80P900X900X160-32N
footprint QFP80P900X900X160-32N
pins: 1 VDD_1, 2 PH0-OSC_IN/PC14, 3 PH1-OSC_OUT, 4 NRST, 5 VREF+, 6 PA0, 7 PA1, 8 PA2, 9 PA3, 10 PA4, 11 PA5, 12 PA6, 13 PA7, 14 PB0, 15 VCAP, 16 VSS_1, 17 VDD_2, 18 PB15, 19 PA8, 20 PA9, 21 PA11, 22 PA12, 23 PA13, 24 PA14, 25 PA15, 26 PB3, 27 PB4, 28 PB5, 29 PB6, 30 PB7, 31 PB8-BOOT0, 32 VSS_2

## STM32C552RET6
designator IC?
Integrated Circuit; Manufacturer_Name: STMicroelectronics; Manufacturer_Part_Number: STM32C552RET6; Datasheet Link: https://www.st.com/resource/en/datasheet/stm32c551cc.pdf; Height: 1.6mm
footprint QFP50P1200X1200X160-64N
pins: 1 PE2, 2 PC13, 3 PC14-OSC32_IN, 4 PC15-OSC32_OUT, 5 PH0-OSC_IN, 6 PH1-OSC_OUT, 7 NRST, 8 PC0, 9 PC1, 10 PC2, 11 PC3, 12 VREF-, 13 VREF+, 14 PA0, 15 PA1, 16 PA2, 17 PA3, 18 VSS_1, 19 VDD_1, 20 PA4, 21 PA5, 22 PA6, 23 PA7, 24 PC4, 25 PC5, 26 PB0, 27 PB1, 28 PB2, 29 PB10, 30 VCAP, 31 VSS_2, 32 VDD_2, 33 PB12, 34 PB13, 35 PB14, 36 PB15, 37 PC6, 38 PC7, 39 PC8, 40 PC9, 41 PA8, 42 PA9, 43 PA10, 44 PA11, 45 PA12, 46 PA13, 47 VSS_3, 48 VDD_3, 49 PA14, 50 PA15, 51 PC10, 52 PC11, 53 PC12, 54 PD2, 55 PB3, 56 PB4, 57 PB5, 58 PB6, 59 PB7, 60 PH2-BOOT0, 61 PB8, 62 PB9, 63 VSS_4, 64 VDD_4

## TBP02R1W-381-03BE
designator J?
Connector; Manufacturer_Name: Same Sky; Manufacturer_Part_Number: TBP02R1W-381-03BE; Datasheet Link: https://www.sameskydevices.com/product/resource/supplyframepdf/tbp02r1w-381.pdf; Height: 7.6mm; Mouser Part Number: 490-TBP02R1W-38103BE; Mouser Price/Stock: https://www.mouser.co.uk/ProductDetail/Same-Sky/TBP02R1W-381-03BE?qs=PzGy0jfpSMuSnzKTk5xTlA%3D%3D; Arrow Part Number: TBP02R1W-381-03BE; Arrow Price/Stock: https://www.arrow.com/en/products/tbp02r1w-381-03be/cui-devices?region=nac
footprint RHDRRA3W80P0X381_1X3_2182X920X760P
pins: 1, 2, 3

## TBP02R1W-381-04BE
designator J?
2~24 Poles, Pluggable, Receptacle, Horizontal, 3.81 Pitch, Terminal Block Connector; Manufacturer_Name: Same Sky; Geometry.Height: 7.6mm; Manufacturer_Part_Number: TBP02R1W-381-04BE; Mouser Part Number: 490-TBP02R1W-38104BE; Mouser Price/Stock: https://www.mouser.co.uk/ProductDetail/CUI-Devices/TBP02R1W-381-04BE?qs=PzGy0jfpSMsR71sBuJNaSA%3D%3D; Arrow Part Number: TBP02R1W-381-04BE; Arrow Price/Stock: https://www.arrow.com/en/products/tbp02r1w-381-04be/cui-devices?utm_currency=USD&region=nac; Datasheet Link: https://www.sameskydevices.com/product/resource/supplyframepdf/tbp02r1w-381.pdf
footprint SHDRRA4W80P0X381_1X4_2563X920X760P
pins: 1, 2, 3, 4

## TCAN1044AVDRQ1
designator B?
CAN Interface IC Enhanced automotive CAN transceiver with standby and 1.8-V I/O support; Manufacturer_Name: Texas Instruments; Geometry.Height: 1.75mm; Manufacturer_Part_Number: TCAN1044AVDRQ1; Mouser Part Number: 595-TCAN1044AVDRQ1; Mouser Price/Stock: https://www.mouser.co.uk/ProductDetail/Texas-Instruments/TCAN1044AVDRQ1?qs=A6eO%252BMLsxmTQ0G0Mn%252B%252BM7w%3D%3D; Arrow Part Number: TCAN1044AVDRQ1; Arrow Price/Stock: https://www.arrow.com/en/products/tcan1044avdrq1/texas-instruments.html?utm_currency=USD&region=europe; Datasheet Link: https://www.ti.com/lit/gpn/tcan1044av-q1
footprint SOIC127P600X175-8N
pins: 1 TXD, 2 GND, 3 VCC, 4 RXD, 5 NC_VIO, 6 CANL, 7 CANH, 8 STB

## TCAN3403DRQ1
designator IC?
Integrated Circuit; Manufacturer_Name: Texas Instruments; Manufacturer_Part_Number: TCAN3403DRQ1; Datasheet Link: https://www.ti.com/lit/ds/symlink/tcan3403-q1.pdf?ts=1732780388772&ref_url=https%253A%252F%252Fwww.ti.com%252Fproduct%252FTCAN3403-Q1%252Fpart-details%252FTCAN3403DRQ1; Height: 1.75mm; Mouser Part Number: 595-TCAN3403DRQ1; Mouser Price/Stock: https://www.mouser.co.uk/ProductDetail/Texas-Instruments/TCAN3403DRQ1?qs=VVKQmw408U8i3BeOClYB9g%3D%3D; Arrow Part Number: TCAN3403DRQ1; Arrow Price/Stock: https://www.arrow.com/en/products/tcan3403drq1/texas-instruments?utm_currency=USD&region=nac
footprint SOIC127P600X175-8N - duplicate
pins: 1 TXD, 2 GND, 3 VCC, 4 RXD, 5 SHDNVIO, 6 CANL, 7 CANH, 8 STB

## TLV75533PDBVR
designator B?
LDO Voltage Regulators 500-mA, Low IQ, Small Size, Low Dropout Regulator 5-SOT-23 -40 to 125; Manufacturer_Name: Texas Instruments; Geometry.Height: 1.45mm; Manufacturer_Part_Number: TLV75533PDBVR; Mouser Part Number: 595-TLV75533PDBVR; Mouser Price/Stock: https://www.mouser.co.uk/ProductDetail/Texas-Instruments/TLV75533PDBVR?qs=55YtniHzbhAKEwqeO2xJXQ%3D%3D; Arrow Part Number: TLV75533PDBVR; Arrow Price/Stock: https://www.arrow.com/en/products/tlv75533pdbvr/texas-instruments?utm_currency=USD&region=nac; Datasheet Link: http://www.ti.com/lit/gpn/tlv755p
footprint SOT95P280X145-5N
pins: 1 IN, 2 GND, 3 EN, 4 NC, 5 OUT

## TPS7B8601QDDARQ1
designator U?
Automotive 500-mA, 40-V, ultra-low-IQ, low-dropout (LDO) linear regulator with power good 8-SO PowerPAD -40 to 150; Manufacturer_Name: Texas Instruments; TYPE: TYPE; RefDes: RefDes; Copyright: Copyright (C) 2026 Ultra Librarian. All rights reserved.; Manufacturer_Part_Number: TPS7B8601QDDARQ1
footprint DDA0008B-IPC_A
pins: 1 OUT (power), 2 NC, 3 NC, 4 NC, 5 GND (power), 6 NC, 7 EN (in), 8 IN (power), 9 Thermal_Pad (power)

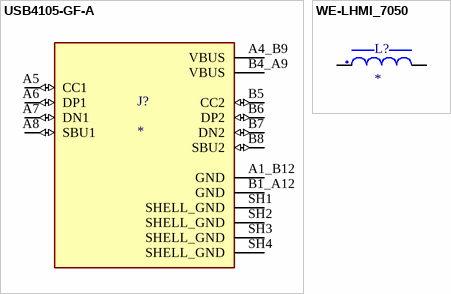
[diagram p2: symbols USB4105-GF-A to WE-LHMI_7050]

## USB4105-GF-A
designator J?
MF: {'manufacturer': u'GCT'}; MP: USB4105-GF-A; Package: None; Price: None; Value: *; Availability: Unavailable
footprint GCT_USB4105-GF-A
pins: A1_B12 GND (power), A4_B9 VBUS (power), A5 CC1 (io), A6 DP1 (io), A7 DN1 (io), A8 SBU1 (io), B1_A12 GND (power), B4_A9 VBUS (power), B5 CC2 (io), B6 DP2 (io), B7 DN2 (io), B8 SBU2 (io), SH1 SHELL_GND (power), SH2 SHELL_GND (power), SH3 SHELL_GND (power), SH4 SHELL_GND (power)

## WE-LHMI_7050
designator L?
Power Inductor, 6.8Uh, Shielded, 6.6A Rohs Compliant: Yes |Wurth Elektronik 7443734948068; MF: Wurth Electronics; SnapEDA_Link: https://www.snapeda.com/parts/7443734948068/Wurth+Electronics/view-part/?ref=snap; Package: None; Value: *; MP: 7443734948068; Check_prices: https://www.snapeda.com/parts/7443734948068/Wurth+Electronics/view-part/?ref=eda
footprint WE-LHMI_7050
pins: 1, 2